# Altium integrated library OK0110_Motorlu Ev Kapı Kilidi_V2_01.IntLib: 97 symbols
Pins are listed as number, name and electrical type; pins without a type are passive.

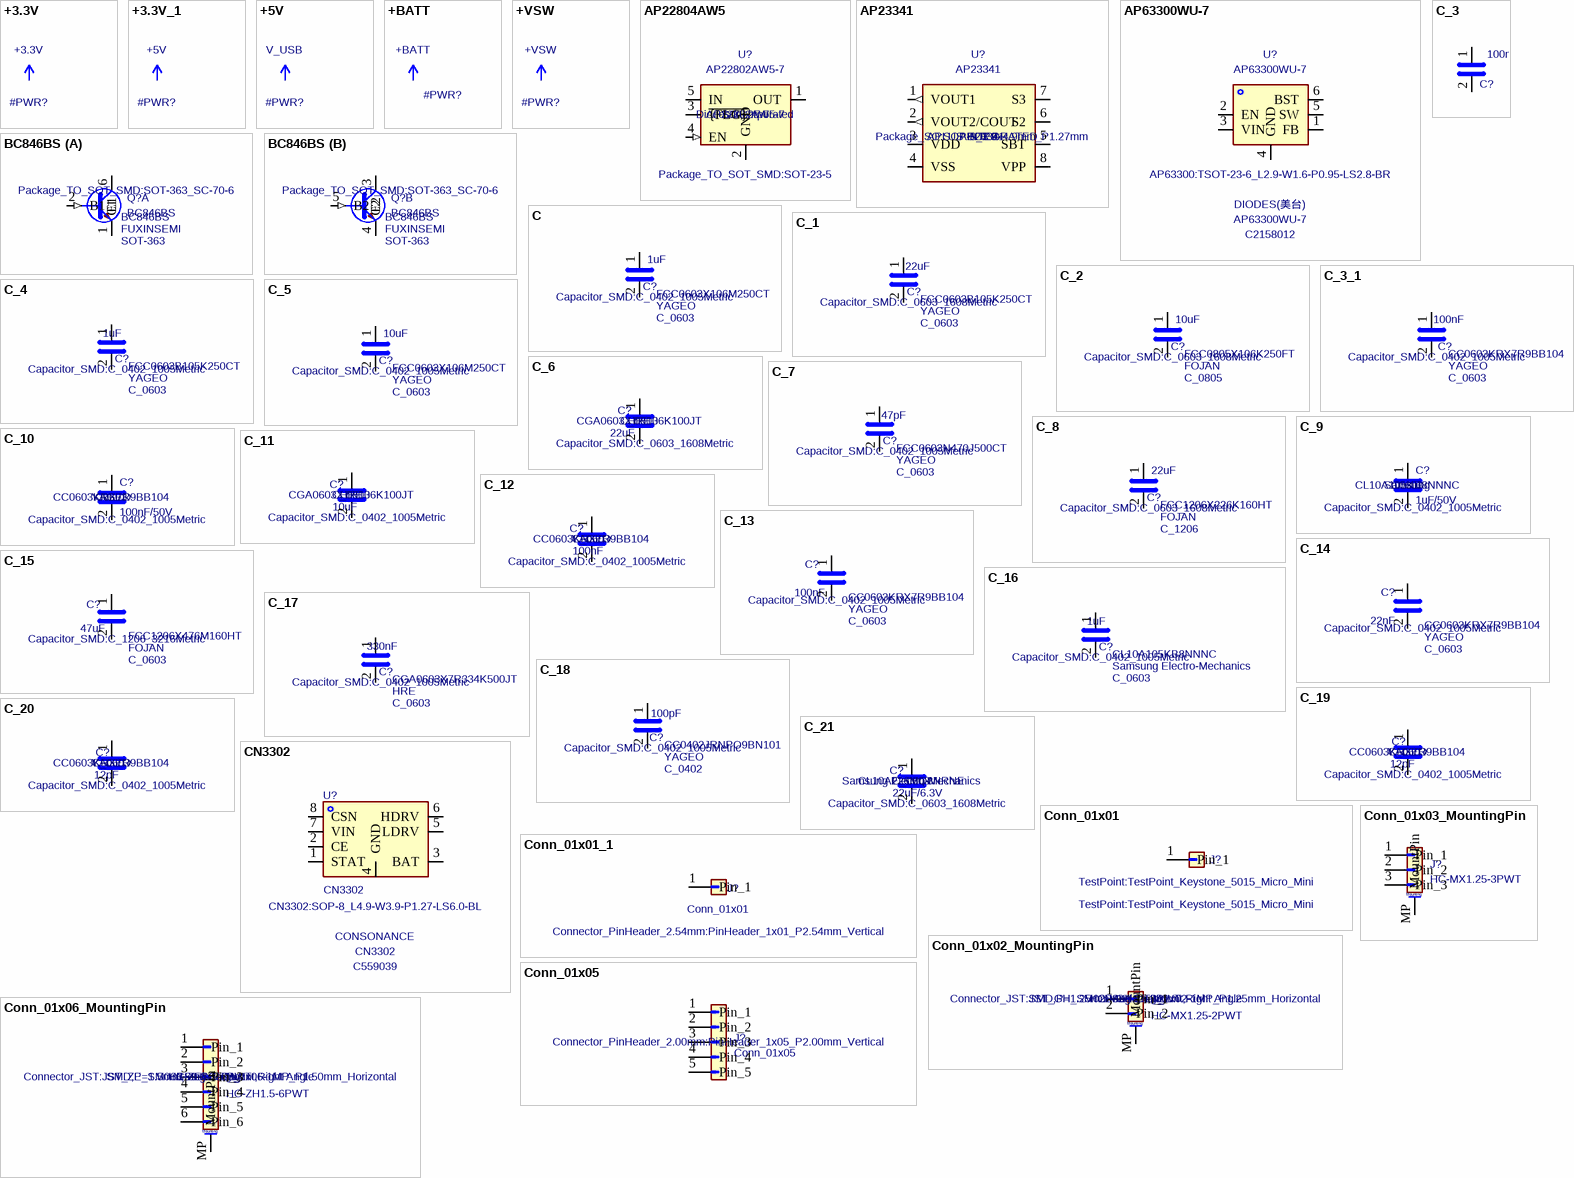
[diagram p0: symbols +3.3V to Conn_01x06_MountingPin]

## +3.3V
designator #PWR?
Value: +3.3V
pins: 1 (power)

## +3.3V_1
designator #PWR?, comment +5V
Value: +5V
pins: 1 (power)

## +5V
designator #PWR?, comment V_USB
Value: V_USB
pins: 1 (power)

## +BATT
designator #PWR?
Value: +BATT
pins: 1 (power)

## +VSW
designator #PWR?
Value: +VSW
pins: 1 (power)

## AP22804AW5
designator U?, comment MF: Diodes Incorporated  Package: SOT-25-5  Footprint: Package_TO_SOT_SMD:SOT-23-5  (hidden comment: AP22802AW5-7)
MP: AP22802AW5-7; Value: AP22802AW5-7
footprint SOT-23-5
pins: 1 OUT (power), 2 GND (power), 3 ~{{FLG}} (oc), 4 EN (in), 5 IN (power)

## AP23341
designator U?  MF: APLUS INTEGRATED  Package: SOP8  Footprint: Package_SO:SOP-8_3.9x4.9mm_P1.27mm  (hidden comment: AP23341)
MP: AP23341; Value: AP23341
footprint SOP-8_3.9x4.9mm_P1.27mm
pins: 1 VOUT1 (out), 2 VOUT2/COUT (out), 3 VDD (power), 4 VSS (power), 5 SBT (io), 6 S2 (io), 7 S3 (io), 8 VPP (power)

## AP63300WU-7
designator U?  Manufacturer: DIODES(美台)  LCSC Part: C2158012  Footprint: AP63300:TSOT-23-6_L2.9-W1.6-P0.95-LS2.8-BR  (hidden comment: AP63300WU-7)
MPN: AP63300WU-7; Value: AP63300WU-7
footprint TSOT-23-6_L2.9-W1.6-P0.95-LS2.8-BR
pins: 1 FB, 2 EN, 3 VIN, 4 GND, 5 SW, 6 BST

## BC846BS
designator Q?  MF: FUXINSEMI  Package: SOT-363  Footprint: Package_TO_SOT_SMD:SOT-363_SC-70-6  (hidden comment: BC846BS)
MP: BC846BS; Value: BC846BS
footprint SOT-363_SC-70-6
part A pins: 1 E1, 2 B1 (in), 6 C1
part B pins: 3 C2, 4 E2, 5 B2 (in)

## C
designator C?, comment MP: FCC0603X106M250CT  MF: YAGEO  Package: C_0603  Footprint: Capacitor_SMD:C_0402_1005Metric  (hidden comment: 1uF)
Value: 1uF
footprint C_0402_1005Metric
pins: 1, 2

## C_1
designator C?, comment MP: FCC0603B105K250CT  MF: YAGEO  Package: C_0603  Footprint: Capacitor_SMD:C_0603_1608Metric  (hidden comment: 22uF)
Value: 22uF
footprint C_0603_1608Metric
pins: 1, 2

## C_2
designator C?, comment MP: FCC0805X106K250FT  MF: FOJAN  Package: C_0805  Footprint: Capacitor_SMD:C_0603_1608Metric  (hidden comment: 10uF)
Value: 10uF
footprint C_0603_1608Metric
pins: 1, 2

## C_3
designator C?, comment 100nF
Package: C_0402; Value: 100nF; Footprint: Capacitor_SMD:C_0402_1005Metric
footprint C_0402_1005Metric
pins: 1, 2

## C_3_1
designator C?, comment MP: CC0603KRX7R9BB104  MF: YAGEO  Package: C_0603  Footprint: Capacitor_SMD:C_0402_1005Metric  (hidden comment: 100nF)
Value: 100nF
footprint C_0402_1005Metric
pins: 1, 2

## C_4
designator C?, comment MP: FCC0603B105K250CT  MF: YAGEO  Package: C_0603  Footprint: Capacitor_SMD:C_0402_1005Metric  (hidden comment: 1uF)
Value: 1uF
footprint C_0402_1005Metric
pins: 1, 2

## C_5
designator C?, comment MP: FCC0603X106M250CT  MF: YAGEO  Package: C_0603  Footprint: Capacitor_SMD:C_0402_1005Metric  (hidden comment: 10uF)
Value: 10uF
footprint C_0402_1005Metric
pins: 1, 2

## C_6
designator C?, comment MP: CGA0603X7R106K100JT  MF: HRE  Package: C_0603  Footprint: Capacitor_SMD:C_0603_1608Metric  (hidden comment: 22uF)
Value: 22uF
footprint C_0603_1608Metric
pins: 1, 2

## C_7
designator C?, comment MP: FCC0603N470J500CT  MF: YAGEO  Package: C_0603  Footprint: Capacitor_SMD:C_0402_1005Metric  (hidden comment: 47pF)
Value: 47pF
footprint C_0402_1005Metric
pins: 1, 2

## C_8
designator C?, comment MP: FCC1206X226K160HT  MF: FOJAN  Package: C_1206  Footprint: Capacitor_SMD:C_0603_1608Metric  (hidden comment: 22uF)
Value: 22uF
footprint C_0603_1608Metric
pins: 1, 2

## C_9
designator C?, comment MP: CL10A105KB8NNNC  MF: Samsung  Package: C0603  Footprint: Capacitor_SMD:C_0402_1005Metric  (hidden comment: 1uF/50V)
Value: 1uF/50V
footprint C_0402_1005Metric
pins: 1, 2

## C_10
designator C?, comment MP: CC0603KRX7R9BB104  MF: YAGEO  Package: C0603  Footprint: Capacitor_SMD:C_0402_1005Metric  (hidden comment: 100nF/50V)
Value: 100nF/50V
footprint C_0402_1005Metric
pins: 1, 2

## C_11
designator C?, comment MP: CGA0603X7R106K100JT  MF: HRE  Package: C_0603  Footprint: Capacitor_SMD:C_0402_1005Metric  (hidden comment: 10uF)
Value: 10uF
footprint C_0402_1005Metric
pins: 1, 2

## C_12
designator C?, comment MP: CC0603KRX7R9BB104  MF: YAGEO  Package: C_0603  Footprint: Capacitor_SMD:C_0402_1005Metric  (hidden comment: 100nF)
Value: 100nF
footprint C_0402_1005Metric
pins: 1, 2

## C_13
designator C?, comment MP: CC0603KRX7R9BB104  MF: YAGEO  Package: C_0603  Footprint: Capacitor_SMD:C_0402_1005Metric  (hidden comment: 100nF)
Value: 100nF
footprint C_0402_1005Metric
pins: 1, 2

## C_14
designator C?, comment MP: CC0603KRX7R9BB104  MF: YAGEO  Package: C_0603  Footprint: Capacitor_SMD:C_0402_1005Metric  (hidden comment: 22nF)
Value: 22nF
footprint C_0402_1005Metric
pins: 1, 2

## C_15
designator C?, comment MP: FCC1206X476M160HT  MF: FOJAN  Package: C_0603  Footprint: Capacitor_SMD:C_1206_3216Metric  (hidden comment: 47uF)
Value: 47uF
footprint C_1206_3216Metric
pins: 1, 2

## C_16
designator C?, comment MP: CL10A105KB8NNNC  MF: Samsung Electro-Mechanics  Package: C_0603  Footprint: Capacitor_SMD:C_0402_1005Metric  (hidden comment: 1uF)
Value: 1uF
footprint C_0402_1005Metric
pins: 1, 2

## C_17
designator C?, comment MP: CGA0603X7R334K500JT  MF: HRE  Package: C_0603  Footprint: Capacitor_SMD:C_0402_1005Metric  (hidden comment: 330nF)
Value: 330nF
footprint C_0402_1005Metric
pins: 1, 2

## C_18
designator C?, comment MP: CC0402JRNPO9BN101  MF: YAGEO  Package: C_0402  Footprint: Capacitor_SMD:C_0402_1005Metric  (hidden comment: 100pF)
Value: 100pF
footprint C_0402_1005Metric
pins: 1, 2

## C_19
designator C?, comment MP: CC0603KRX7R9BB104  MF: YAGEO  Package: C_0603  Footprint: Capacitor_SMD:C_0402_1005Metric  (hidden comment: 12pF)
Value: 12pF
footprint C_0402_1005Metric
pins: 1, 2

## C_20
designator C?, comment MP: CC0603KRX7R9BB104  MF: YAGEO  Package: C_0603  Footprint: Capacitor_SMD:C_0402_1005Metric  (hidden comment: 12pF)
Value: 12pF
footprint C_0402_1005Metric
pins: 1, 2

## C_21
designator C?, comment MP: CL10A226MQ8NRNE  MF: Samsung Electro-Mechanics  Package: C_0603  Footprint: Capacitor_SMD:C_0603_1608Metric  (hidden comment: 22uF/6.3V)
Value: 22uF/6.3V
footprint C_0603_1608Metric
pins: 1, 2

## CN3302
designator U?  Manufacturer: CONSONANCE  LCSC Part: C559039  Footprint: CN3302:SOP-8_L4.9-W3.9-P1.27-LS6.0-BL  (hidden comment: CN3302)
MPN: CN3302; Value: CN3302
footprint SOP-8_L4.9-W3.9-P1.27-LS6.0-BL
pins: 1 STAT, 2 CE, 3 BAT, 4 GND, 5 LDRV, 6 HDRV, 7 VIN, 8 CSN

## Conn_01x01
designator J?, comment TestPoint:TestPoint_Keystone_5015_Micro_Mini
Value: TestPoint:TestPoint_Keystone_5015_Micro_Mini; Footprint: TestPoint:TestPoint_Keystone_5015_Micro_Mini
footprint TestPoint_Keystone_5015_Micro_Mini
pins: 1 Pin_1

## Conn_01x01_1
designator J?, comment Footprint: Connector_PinHeader_2.54mm:PinHeader_1x01_P2.54mm_Vertical  (hidden comment: Conn_01x01)
Value: Conn_01x01
footprint PinHeader_1x01_P2.54mm_Vertical
pins: 1 Pin_1

## Conn_01x02_MountingPin
designator J?, comment MF: Hong Cheng  Package: SMD,P=1.25mm,Surface Mount,Right Angle  Footprint: Connector_JST:JST_GH_SM02B-GHS-TB_1x02-1MP_P1.25mm_Horizontal  (hidden comment: HC-MX1.25-2PWT)
MP: HC-MX1.25-2PWT; Value: HC-MX1.25-2PWT
footprint JST_GH_SM02B-GHS-TB_1x02-1MP_P1.25mm_Horizontal
pins: 1 Pin_1, 2 Pin_2, MP MountPin
text: Mounting

## Conn_01x03_MountingPin
designator J?, comment HC-MX1.25-3PWT
MF: Hong Cheng; MP: HC-MX1.25-3PWT; Package: SMD,P=1.25mm,Surface Mount,Right Angle; Value: HC-MX1.25-3PWT; Footprint: Connector_JST:JST_GH_SM03B-GHS-TB_1x03-1MP_P1.25mm_Horizontal
footprint JST_GH_SM03B-GHS-TB_1x03-1MP_P1.25mm_Horizontal
pins: 1 Pin_1, 2 Pin_2, 3 Pin_3, MP MountPin
text: Mounting

## Conn_01x05
designator J?  Footprint: Connector_PinHeader_2.00mm:PinHeader_1x05_P2.00mm_Vertical  (hidden comment: Conn_01x05)
Value: Conn_01x05
footprint PinHeader_1x05_P2.00mm_Vertical
pins: 1 Pin_1, 2 Pin_2, 3 Pin_3, 4 Pin_4, 5 Pin_5

## Conn_01x06_MountingPin
designator J?, comment MF: Hong Cheng  Package: SMD,P=1.5mm,Surface Mount,Right Angle  Footprint: Connector_JST:JST_ZE_SM06B-ZESS-TB_1x06-1MP_P1.50mm_Horizontal  (hidden comment: HC-ZH1.5-6PWT)
MP: HC-ZH1.5-6PWT; Value: HC-ZH1.5-6PWT
footprint JST_ZE_SM06B-ZESS-TB_1x06-1MP_P1.50mm_Horizontal
pins: 1 Pin_1, 2 Pin_2, 3 Pin_3, 4 Pin_4, 5 Pin_5, 6 Pin_6, MP MountPin
text: Mounting

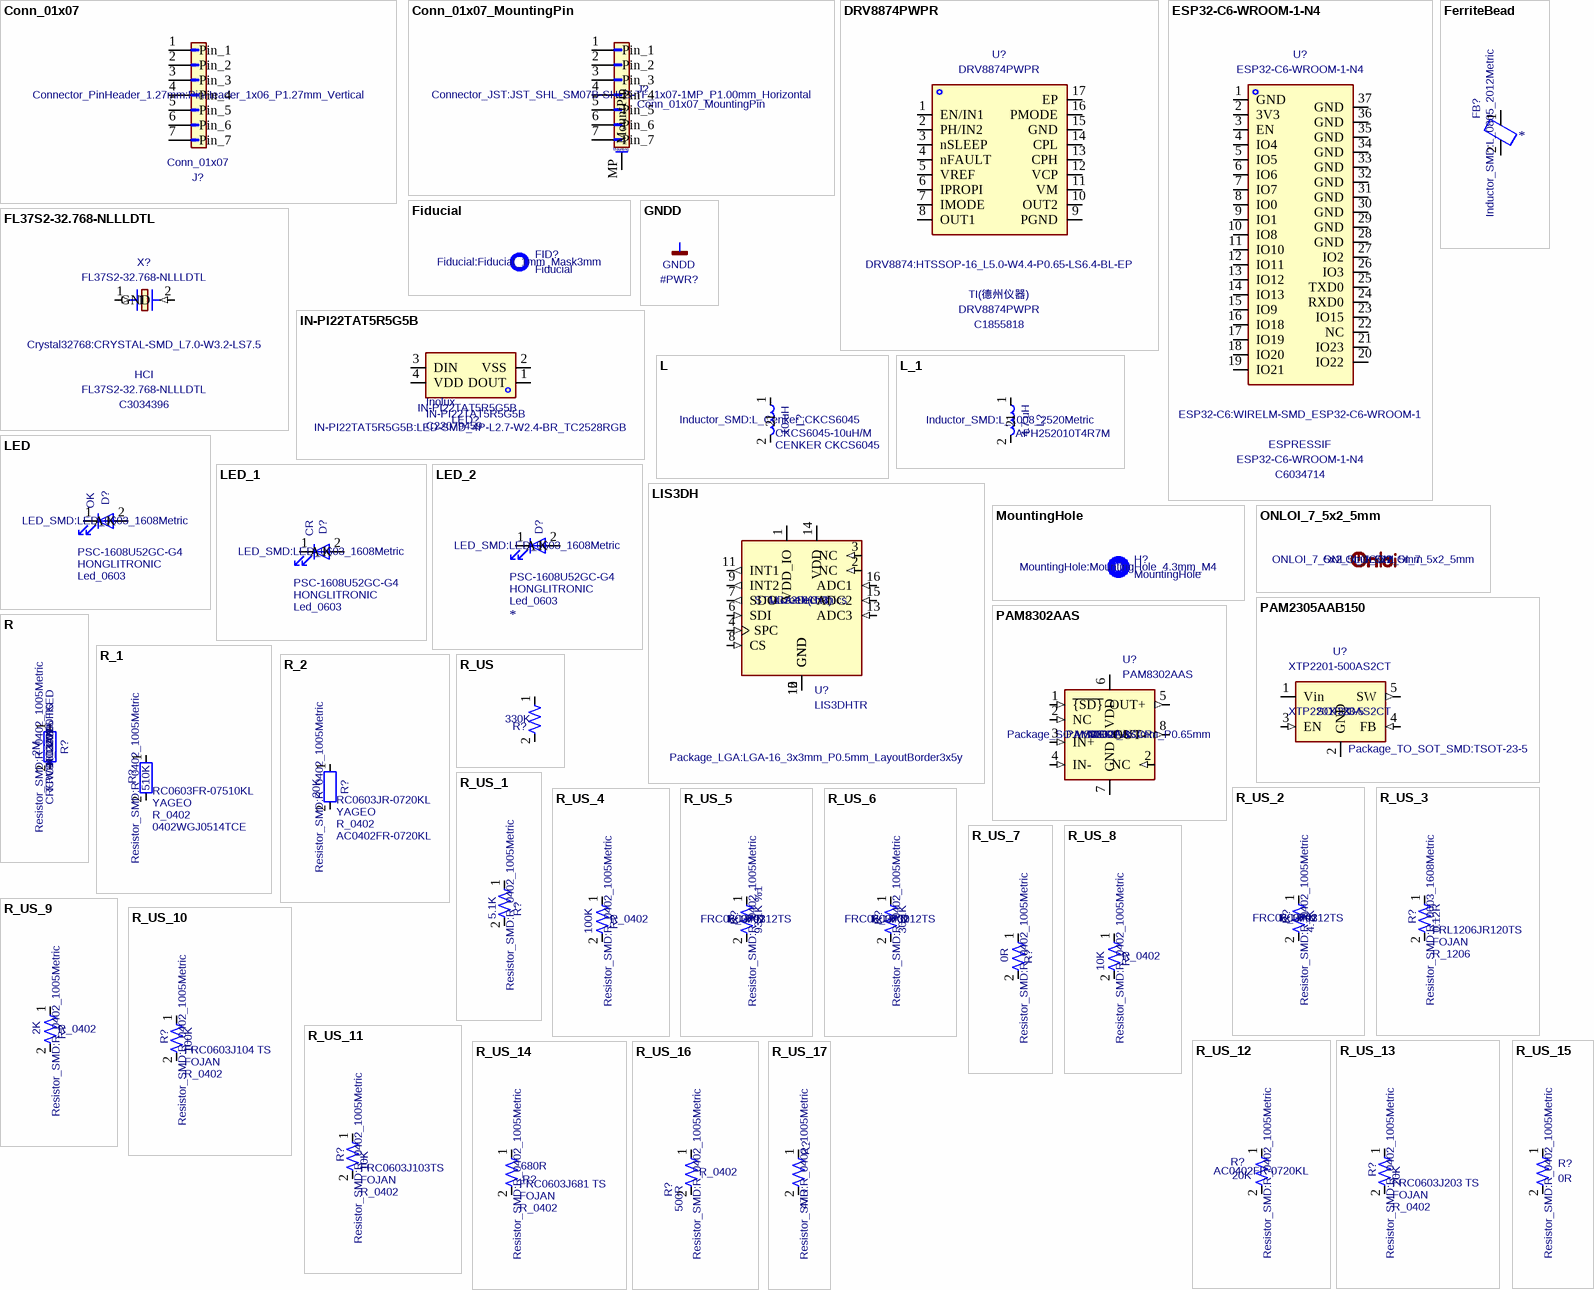
[diagram p1: symbols Conn_01x07 to R_US_17]

## Conn_01x07
designator J?  Footprint: Connector_PinHeader_1.27mm:PinHeader_1x06_P1.27mm_Vertical  (hidden comment: Conn_01x07)
Value: Conn_01x07
footprint PinHeader_1x06_P1.27mm_Vertical
pins: 1 Pin_1, 2 Pin_2, 3 Pin_3, 4 Pin_4, 5 Pin_5, 6 Pin_6, 7 Pin_7

## Conn_01x07_MountingPin
designator J?  Footprint: Connector_JST:JST_SHL_SM07B-SHLS-TF_1x07-1MP_P1.00mm_Horizontal  (hidden comment: Conn_01x07_MountingPin)
Value: Conn_01x07_MountingPin
footprint JST_SHL_SM07B-SHLS-TF_1x07-1MP_P1.00mm_Horizontal
pins: 1 Pin_1, 2 Pin_2, 3 Pin_3, 4 Pin_4, 5 Pin_5, 6 Pin_6, 7 Pin_7, MP MountPin
text: Mounting

## DRV8874PWPR
designator U?  Manufacturer: TI(德州仪器)  LCSC Part: C1855818  Footprint: DRV8874:HTSSOP-16_L5.0-W4.4-P0.65-LS6.4-BL-EP  (hidden comment: DRV8874PWPR)
MPN: DRV8874PWPR; Value: DRV8874PWPR
footprint HTSSOP-16_L5.0-W4.4-P0.65-LS6.4-BL-EP
pins: 1 EN/IN1, 2 PH/IN2, 3 nSLEEP, 4 nFAULT, 5 VREF, 6 IPROPI, 7 IMODE, 8 OUT1, 9 PGND, 10 OUT2, 11 VM, 12 VCP, 13 CPH, 14 CPL, 15 GND, 16 PMODE, 17 EP

## ESP32-C6-WROOM-1-N4
designator U?  Manufacturer: ESPRESSIF  LCSC Part: C6034714  Footprint: ESP32-C6:WIRELM-SMD_ESP32-C6-WROOM-1  (hidden comment: ESP32-C6-WROOM-1-N4)
MPN: ESP32-C6-WROOM-1-N4; Value: ESP32-C6-WROOM-1-N4
footprint WIRELM-SMD_ESP32-C6-WROOM-1
pins: 1 GND, 2 3V3, 3 EN, 4 IO4, 5 IO5, 6 IO6, 7 IO7, 8 IO0, 9 IO1, 10 IO8, 11 IO10, 12 IO11, 13 IO12, 14 IO13, 15 IO9, 16 IO18, 17 IO19, 18 IO20, 19 IO21, 20 IO22, 21 IO23, 22 NC, 23 IO15, 24 RXD0, 25 TXD0, 26 IO3, 27 IO2, 28 GND, 29 GND, 30 GND, 31 GND, 32 GND, 33 GND, 34 GND, 35 GND, 36 GND, 37 GND

## FerriteBead
designator FB?  Footprint: Inductor_SMD:L_0805_2012Metric
footprint L_0805_2012Metric
pins: 1, 2

## Fiducial
designator FID?  Footprint: Fiducial:Fiducial_1mm_Mask3mm  (hidden comment: Fiducial)
Value: Fiducial
footprint Fiducial_1mm_Mask3mm

## FL37S2-32.768-NLLLDTL
designator X?  Manufacturer: HCI  LCSC Part: C3034396  Footprint: Crystal32768:CRYSTAL-SMD_L7.0-W3.2-LS7.5  (hidden comment: FL37S2-32.768-NLLLDTL)
MPN: FL37S2-32.768-NLLLDTL; Value: FL37S2-32.768-NLLLDTL
footprint CRYSTAL-SMD_L7.0-W3.2-LS7.5
pins: 1 (in), 2 GND (in)

## GNDD
designator #PWR?
Value: GNDD
pins: 1 GNDD (power)

## IN-PI22TAT5R5G5B
designator LED?  Manufacturer: Inolux  LCSC Part: C22079459  Footprint: IN-PI22TAT5R5G5B:LED-SMD_4P-L2.7-W2.4-BR_TC2528RGB  (hidden comment: IN-PI22TAT5R5G5B)
MPN: IN-PI22TAT5R5G5B; Value: IN-PI22TAT5R5G5B
footprint LED-SMD_4P-L2.7-W2.4-BR_TC2528RGB
pins: 1 DOUT, 2 VSS, 3 DIN, 4 VDD

## L
designator L?, comment MP: CKCS6045-10uH/M  Üretici: CENKER CKCS6045  Footprint: Inductor_SMD:L_Cenker_CKCS6045  (hidden comment: 10 uH)
Value: 10 uH
footprint L_Cenker_CKCS6045
pins: 1, 2

## L_1
designator L?, comment MP: APH252010T4R7M  Footprint: Inductor_SMD:L_1008_2520Metric  (hidden comment: 4.7 uH)
Value: 4.7 uH
footprint L_1008_2520Metric
pins: 1, 2

## LED
designator D?, comment MP: PSC-1608U52GC-G4  MF: HONGLITRONIC  Package: Led_0603  Footprint: LED_SMD:LED_0603_1608Metric  (hidden comment: OK)
Value: OK
footprint LED_0603_1608Metric
pins: 1 K, 2 A

## LED_1
designator D?, comment MP: PSC-1608U52GC-G4  MF: HONGLITRONIC  Package: Led_0603  Footprint: LED_SMD:LED_0603_1608Metric  (hidden comment: CR)
Value: CR
footprint LED_0603_1608Metric
pins: 1 K, 2 A

## LED_2
designator D?  MP: PSC-1608U52GC-G4  MF: HONGLITRONIC  Package: Led_0603  Footprint: LED_SMD:LED_0603_1608Metric
footprint LED_0603_1608Metric
pins: 1 K, 2 A

## LIS3DH
designator U?, comment MF: STMicroelectronics  Package: LGA-16(3x3)  Footprint: Package_LGA:LGA-16_3x3mm_P0.5mm_LayoutBorder3x5y  (hidden comment: LIS3DHTR)
MP: LIS3DHTR; Value: LIS3DHTR
footprint LGA-16_3x3mm_P0.5mm_LayoutBorder3x5y
pins: 1 VDD_IO (power), 2 NC (in), 3 NC (in), 4 SPC (in), 5 GND (power), 6 SDI (in), 7 SDO (out), 8 CS (in), 9 INT2 (out), 10 GND, 11 INT1 (out), 12 GND, 13 ADC3 (in), 14 VDD (power), 15 ADC2 (in), 16 ADC1 (in)

## MountingHole
designator H?  Footprint: MountingHole:MountingHole_4.3mm_M4  (hidden comment: MountingHole)
Value: MountingHole
footprint MountingHole_4.3mm_M4

## ONLOI_7_5x2_5mm
designator LOGO?  Footprint: ONLOI_7_5x2_5mm:ONLOI_7_5x2_5mm  (hidden comment: ONLOI_7_5x2_5mm)
Value: ONLOI_7_5x2_5mm
footprint ONLOI_7_5x2_5mm

## PAM2305AAB150
designator U?, comment MP: XTP2201-330AS2CT  MF: XTX  Package: SOT-23-5  Footprint: Package_TO_SOT_SMD:TSOT-23-5  (hidden comment: XTP2201-500AS2CT)
Value: XTP2201-500AS2CT
footprint TSOT-23-5
pins: 1 Vin (power), 2 GND (power), 3 EN (in), 4 FB (in), 5 SW (out)

## PAM8302AAS
designator U?  MP: PAM8302AASCR  MF: DIODES  Package: MSOP-8  Footprint: Package_SO:MSOP-8_3x3mm_P0.65mm  (hidden comment: PAM8302AAS)
OZD: PAM8302AASCR; Value: PAM8302AAS
footprint MSOP-8_3x3mm_P0.65mm
pins: 1 ~{{SD}} (in), 2 NC (in), 2 NC (in), 3 IN+ (in), 4 IN- (in), 5 OUT+ (out), 6 VDD (power), 7 GND (power), 8 OUT- (out)

## R
designator R?, comment MP: FRC0603J205 TS  MF: FOJAN  Package: R_0402  OZD: CRCW04022M00FKED  Footprint: Resistor_SMD:R_0402_1005Metric  (hidden comment: 2M)
Value: 2M
footprint R_0402_1005Metric
pins: 1, 2

## R_1
designator R?, comment MP: RC0603FR-07510KL  MF: YAGEO  Package: R_0402  OZD: 0402WGJ0514TCE  Footprint: Resistor_SMD:R_0402_1005Metric  (hidden comment: 510K)
Value: 510K
footprint R_0402_1005Metric
pins: 1, 2

## R_2
designator R?, comment MP: RC0603JR-0720KL  MF: YAGEO  Package: R_0402  OZD: AC0402FR-0720KL  Footprint: Resistor_SMD:R_0402_1005Metric  (hidden comment: 20K)
Value: 20K
footprint R_0402_1005Metric
pins: 1, 2

## R_US
designator R?, comment 330K
Package: R_0402; Value: 330K; Footprint: Resistor_SMD:R_0402_1005Metric
footprint R_0402_1005Metric
pins: 1, 2

## R_US_1
designator R?, comment Footprint: Resistor_SMD:R_0402_1005Metric  (hidden comment: 5.1K)
Value: 5.1K
footprint R_0402_1005Metric
pins: 1, 2

## R_US_2
designator R?, comment MP: FRC0603F9312TS  MF: FOJAN  Package: R_0402  Footprint: Resistor_SMD:R_0402_1005Metric  (hidden comment: 4.7K)
Value: 4.7K
footprint R_0402_1005Metric
pins: 1, 2

## R_US_3
designator R?, comment MP: FRL1206JR120TS  MF: FOJAN  Package: R_1206  Footprint: Resistor_SMD:R_0603_1608Metric  (hidden comment: 0.12R)
Value: 0.12R
footprint R_0603_1608Metric
pins: 1, 2

## R_US_4
designator R?, comment Package: R_0402  Footprint: Resistor_SMD:R_0402_1005Metric  (hidden comment: 100K)
Value: 100K
footprint R_0402_1005Metric
pins: 1, 2

## R_US_5
designator R?, comment MP: FRC0603F9312TS  MF: FOJAN  Package: R_0402  Footprint: Resistor_SMD:R_0402_1005Metric  (hidden comment: 93.1K %1)
Value: 93.1K %1
footprint R_0402_1005Metric
pins: 1, 2

## R_US_6
designator R?, comment MP: FRC0603F3012TS  MF: FOJAN  Package: R_0402  Footprint: Resistor_SMD:R_0402_1005Metric  (hidden comment: 30.1K)
Value: 30.1K
footprint R_0402_1005Metric
pins: 1, 2

## R_US_7
designator R?, comment Footprint: Resistor_SMD:R_0402_1005Metric  (hidden comment: 0R)
Value: 0R
footprint R_0402_1005Metric
pins: 1, 2

## R_US_8
designator R?, comment Package: R_0402  Footprint: Resistor_SMD:R_0402_1005Metric  (hidden comment: 10K)
Value: 10K
footprint R_0402_1005Metric
pins: 1, 2

## R_US_9
designator R?, comment Package: R_0402  Footprint: Resistor_SMD:R_0402_1005Metric  (hidden comment: 2K)
Value: 2K
footprint R_0402_1005Metric
pins: 1, 2

## R_US_10
designator R?, comment MP: FRC0603J104 TS  MF: FOJAN  Package: R_0402  Footprint: Resistor_SMD:R_0402_1005Metric  (hidden comment: 100K)
Value: 100K
footprint R_0402_1005Metric
pins: 1, 2

## R_US_11
designator R?, comment MP: FRC0603J103TS  MF: FOJAN  Package: R_0402  Footprint: Resistor_SMD:R_0402_1005Metric  (hidden comment: 10K)
Value: 10K
footprint R_0402_1005Metric
pins: 1, 2

## R_US_12
designator R?, comment OZD: AC0402FR-0720KL  Footprint: Resistor_SMD:R_0402_1005Metric  (hidden comment: 20K)
Value: 20K
footprint R_0402_1005Metric
pins: 1, 2

## R_US_13
designator R?, comment MP: FRC0603J203 TS  MF: FOJAN  Package: R_0402  Footprint: Resistor_SMD:R_0402_1005Metric  (hidden comment: 20K)
Value: 20K
footprint R_0402_1005Metric
pins: 1, 2

## R_US_14
designator R?, comment MP: FRC0603J681 TS  MF: FOJAN  Package: R_0402  Footprint: Resistor_SMD:R_0402_1005Metric  (hidden comment: 680R)
Value: 680R
footprint R_0402_1005Metric
pins: 1, 2

## R_US_15
designator R?, comment Footprint: Resistor_SMD:R_0402_1005Metric  (hidden comment: 0R)
Value: 0R
footprint R_0402_1005Metric
pins: 1, 2

## R_US_16
designator R?, comment Package: R_0402  Footprint: Resistor_SMD:R_0402_1005Metric  (hidden comment: 500R)
Value: 500R
footprint R_0402_1005Metric
pins: 1, 2

## R_US_17
designator R?, comment Footprint: Resistor_SMD:R_0402_1005Metric  (hidden comment: 47R)
Value: 47R
footprint R_0402_1005Metric
pins: 1, 2

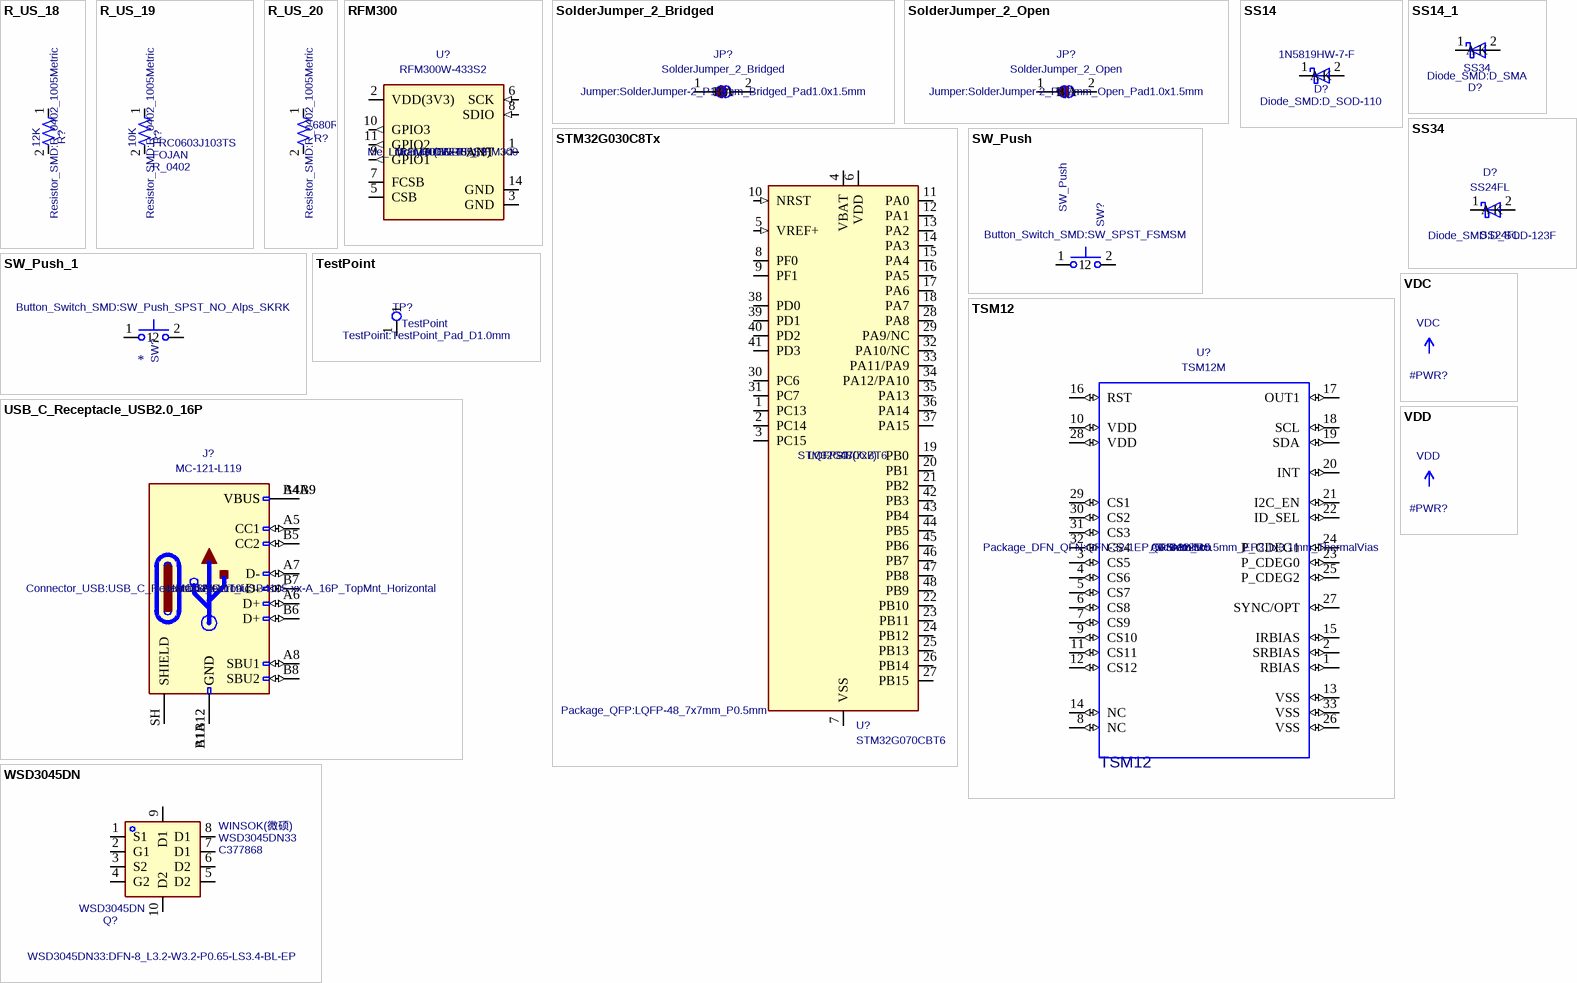
[diagram p2: symbols R_US_18 to WSD3045DN]

## R_US_18
designator R?, comment Footprint: Resistor_SMD:R_0402_1005Metric  (hidden comment: 12K)
Value: 12K
footprint R_0402_1005Metric
pins: 1, 2

## R_US_19
designator R?, comment MP: FRC0603J103TS  MF: FOJAN  Package: R_0402  Footprint: Resistor_SMD:R_0402_1005Metric  (hidden comment: 10K)
Value: 10K
footprint R_0402_1005Metric
pins: 1, 2

## R_US_20
designator R?, comment Footprint: Resistor_SMD:R_0402_1005Metric  (hidden comment: 680R)
Value: 680R
footprint R_0402_1005Metric
pins: 1, 2

## RFM300
designator U?, comment MF: HOPERF  Package: Module (16x16x1.8)  Footprint: Me_Library:HOPERF_RFM300  (hidden comment: RFM300W-433S2)
MP: RFM300W-433S2; Value: RFM300W-433S2
footprint HOPERF_RFM300
pins: 1 ANT (in), 2 VDD(3V3) (io), 3 GND (power), 5 CSB (io), 6 SCK (in), 7 FCSB (io), 8 SDIO (in), 9 GPIO1 (out), 10 GPIO3 (out), 11 GPIO2 (out), 14 GND (power)

## SolderJumper_2_Bridged
designator JP?  Footprint: Jumper:SolderJumper-2_P1.3mm_Bridged_Pad1.0x1.5mm  (hidden comment: SolderJumper_2_Bridged)
Value: SolderJumper_2_Bridged
footprint SolderJumper-2_P1.3mm_Bridged_Pad1.0x1.5mm
pins: 1 A, 2 B

## SolderJumper_2_Open
designator JP?  Footprint: Jumper:SolderJumper-2_P1.3mm_Open_Pad1.0x1.5mm  (hidden comment: SolderJumper_2_Open)
Value: SolderJumper_2_Open
footprint SolderJumper-2_P1.3mm_Open_Pad1.0x1.5mm
pins: 1 A, 2 B

## SS14
designator D?, comment Footprint: Diode_SMD:D_SOD-110  (hidden comment: 1N5819HW-7-F)
Value: 1N5819HW-7-F
footprint D_SOD-110
pins: 1 K, 2 A

## SS14_1
designator D?, comment Footprint: Diode_SMD:D_SMA  (hidden comment: SS34)
Value: SS34
footprint D_SMA
pins: 1 K, 2 A

## SS34
designator D?, comment Footprint: Diode_SMD:D_SOD-123F  (hidden comment: SS24FL)
MPN: SS24FL; Value: SS24FL
footprint D_SOD-123F
pins: 1 K, 2 A

## STM32G030C8Tx
designator U?, comment MF: ST  Package: LQFP-48(7x7)  Footprint: Package_QFP:LQFP-48_7x7mm_P0.5mm  (hidden comment: STM32G070CBT6)
MP: STM32G070CBT6; Value: STM32G070CBT6
footprint LQFP-48_7x7mm_P0.5mm
pins: 1 PC13 (io), 2 PC14 (io), 3 PC15 (io), 4 VBAT (power), 5 VREF+ (in), 6 VDD (power), 7 VSS (power), 8 PF0 (io), 9 PF1 (io), 10 NRST (in), 11 PA0 (io), 12 PA1 (io), 13 PA2 (io), 14 PA3 (io), 15 PA4 (io), 16 PA5 (io), 17 PA6 (io), 18 PA7 (io), 19 PB0 (io), 20 PB1 (io), 21 PB2 (io), 22 PB10 (io), 23 PB11 (io), 24 PB12 (io), 25 PB13 (io), 26 PB14 (io), 27 PB15 (io), 28 PA8 (io), 29 PA9/NC (io), 30 PC6 (io), 31 PC7 (io), 32 PA10/NC (io), 33 PA11/PA9 (io), 34 PA12/PA10 (io), 35 PA13 (io), 36 PA14 (io), 37 PA15 (io), 38 PD0 (io), 39 PD1 (io), 40 PD2 (io), 41 PD3 (io), 42 PB3 (io), 43 PB4 (io), 44 PB5 (io), 45 PB6 (io), 46 PB7 (io), 47 PB8 (io), 48 PB9 (io)

## SW_Push
designator SW?  Footprint: Button_Switch_SMD:SW_SPST_FSMSM  (hidden comment: SW_Push)
Value: SW_Push
footprint SW_SPST_FSMSM
pins: 1, 2

## SW_Push_1
designator SW?  Footprint: Button_Switch_SMD:SW_Push_SPST_NO_Alps_SKRK
footprint SW_Push_SPST_NO_Alps_SKRK
pins: 1, 2

## TestPoint
designator TP?  Footprint: TestPoint:TestPoint_Pad_D1.0mm  (hidden comment: TestPoint)
Value: TestPoint
footprint TestPoint_Pad_D1.0mm
pins: 1

## TSM12
designator U?, comment MF: AD Semicon  Package: QFN-32-5x5  Footprint: Package_DFN_QFN:QFN-32-1EP_5x5mm_P0.5mm_EP3.1x3.1mm_ThermalVias  (hidden comment: TSM12M)
MP: TSM12M; Value: TSM12M
footprint QFN-32-1EP_5x5mm_P0.5mm_EP3.1x3.1mm_ThermalVias
pins: 1 RBIAS (io), 2 SRBIAS (io), 3 CS5 (io), 4 CS6 (io), 5 CS7 (io), 6 CS8 (io), 7 CS9 (io), 8 NC (io), 9 CS10 (io), 10 VDD (io), 11 CS11 (io), 12 CS12 (io), 13 VSS (io), 14 NC (io), 15 IRBIAS (io), 16 RST (io), 17 OUT1 (io), 18 SCL (io), 19 SDA (io), 20 INT (io), 21 I2C_EN (io), 22 ID_SEL (io), 23 P_CDEG0 (io), 24 P_CDEG1 (io), 25 P_CDEG2 (io), 26 VSS (io), 27 SYNC/OPT (io), 28 VDD (io), 29 CS1 (io), 30 CS2 (io), 31 CS3 (io), 32 CS4 (io), 33 VSS (io)

## USB_C_Receptacle_USB2.0_16P
designator J?, comment MF: Hanbo Electronic  Package: SMD  Footprint: Connector_USB:USB_C_Receptacle_GCT_USB4105-xx-A_16P_TopMnt_Horizontal  (hidden comment: MC-121-L119)
MP: MC-121-L119; Value: MC-121-L119
footprint USB_C_Receptacle_GCT_USB4105-xx-A_16P_TopMnt_Horizontal
pins: A1B12 GND, A4B9 VBUS, A5 CC1 (io), A6 D+ (io), A7 D- (io), A8 SBU1 (io), B1A12 GND, B4A9 VBUS, B5 CC2 (io), B6 D+ (io), B7 D- (io), B8 SBU2 (io), SH SHIELD

## VDC
designator #PWR?
Value: VDC
pins: 1 (power)

## VDD
designator #PWR?
Value: VDD
pins: 1 (power)

## WSD3045DN
designator Q?  Manufacturer: WINSOK(微硕)  MPN: WSD3045DN33  LCSC Part: C377868  Footprint: WSD3045DN33:DFN-8_L3.2-W3.2-P0.65-LS3.4-BL-EP  (hidden comment: WSD3045DN)
Value: WSD3045DN
footprint DFN-8_L3.2-W3.2-P0.65-LS3.4-BL-EP
pins: 1 S1, 2 G1, 3 S2, 4 G2, 5 D2, 6 D2, 7 D1, 8 D1, 9 D1, 10 D2